# Altium footprint library Terminal_Blocks_Pluggable PCB_5.08mm.PcbLib: 299 footprints (part 6 of 19)
Each footprint in its own frame and in the unit in brackets; x right, y up, seen from the top. Pads: shape width x height; smd on the part's side, far side on the other; paste and mask are expansions set on the pad; w line width, h text height; cw(c..) or ccw(c..) is an arc to the next point about the centre after c.
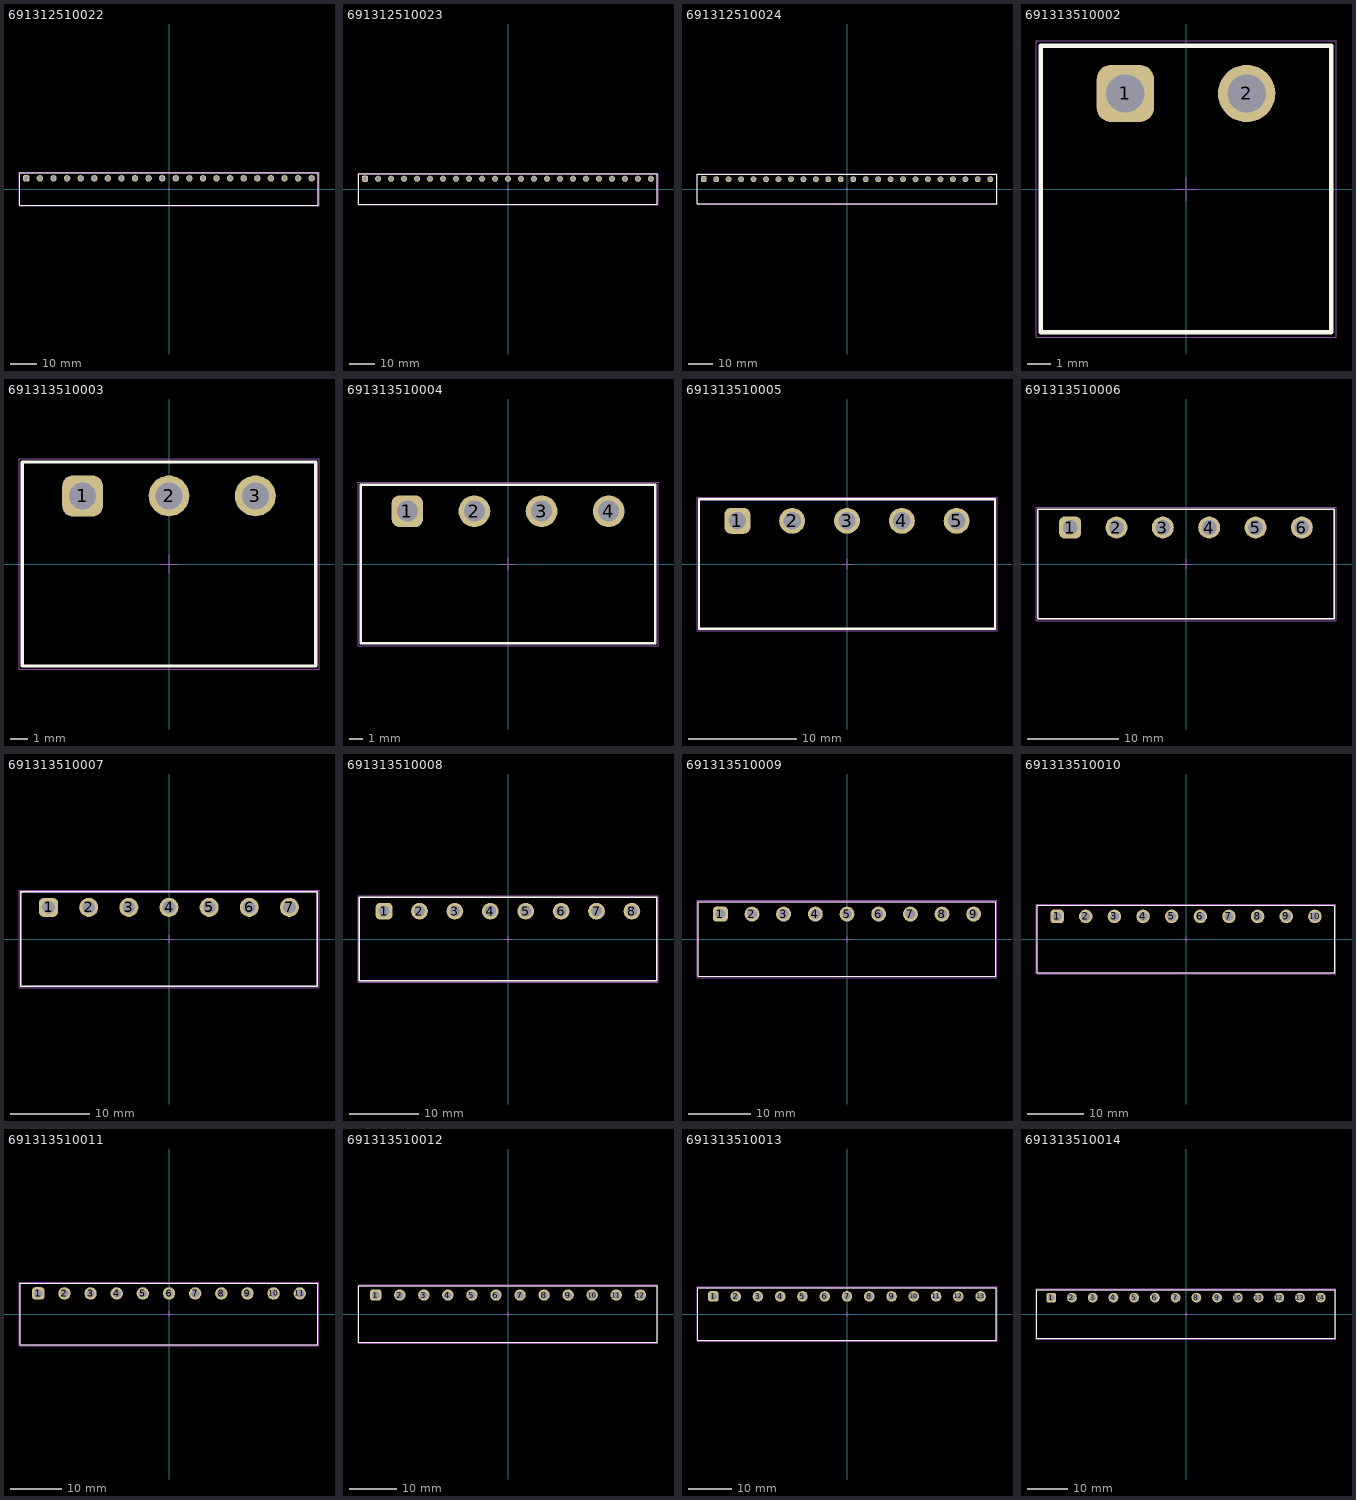
[diagram p5: the footprints below, top view; thin cyan lines are the x and y axes]

## 691312510022 [mm] "5,08mm - PCB Headers - Horizontal - Opened ends - 22p"
height 8.5
pads (22):
  rrect50% 2.4x2.4 hole 1.6: 1(-53.34,4)
  round 2.4 hole 1.6: 2(-48.26,4) 3(-43.18,4) 4(-38.1,4) 5(-33.02,4) 6(-27.94,4) 7(-22.86,4) 8(-17.78,4) 9(-12.7,4) 10(-7.62,4) 11(-2.54,4) 12(2.54,4) 13(7.62,4) 14(12.7,4) 15(17.78,4) 16(22.86,4) 17(27.94,4) 18(33.02,4) 19(38.1,4) 20(43.18,4) 21(48.26,4) 22(53.34,4)
Top Overlay:
  lines w0.2: -55.88,-6 -55.88,6 55.88,6 55.88,-6 -55.88,-6
Top Designator:
  text ".Designator" at -7.498,-0.5 h1.5
Top Component Outline:
  lines w0.1: -55.88,-6 55.88,-6 55.88,6 -55.88,6 -55.88,-6
Top 3D Body:
  lines w0.1: -55.88,-6 -55.88,6 55.88,6 55.88,-6 -55.88,-6
Top Courtyard:
  lines w0.05: -56.08,-6.2 -56.08,6.2 56.08,6.2 56.08,-6.2 -56.08,-6.2
Top Component Center:
  lines w0.05: -0.5,0 0.5,0 ; 0,-0.5 0,0.5
3D body "691312510022.stp": height 8.55, standoff -3.45, extent -55.88,-6 55.88,6

## 691312510023 [mm] "5,08mm - PCB Headers - Horizontal - Opened ends - 23p"
height 8.5
pads (23):
  rrect50% 2.4x2.4 hole 1.6: 1(-55.88,4)
  round 2.4 hole 1.6: 2(-50.8,4) 3(-45.72,4) 4(-40.64,4) 5(-35.56,4) 6(-30.48,4) 7(-25.4,4) 8(-20.32,4) 9(-15.24,4) 10(-10.16,4) 11(-5.08,4) 12(0,4) 13(5.08,4) 14(10.16,4) 15(15.24,4) 16(20.32,4) 17(25.4,4) 18(30.48,4) 19(35.56,4) 20(40.64,4) 21(45.72,4) 22(50.8,4) 23(55.88,4)
Top Overlay:
  lines w0.2: -58.42,-6 -58.42,6 58.42,6 58.42,-6 -58.42,-6
Top Designator:
  text ".Designator" at -7.498,-0.5 h1.5
Top Component Outline:
  lines w0.1: -58.42,-6 58.42,-6 58.42,6 -58.42,6 -58.42,-6
Top 3D Body:
  lines w0.1: -58.42,-6 -58.42,6 58.42,6 58.42,-6 -58.42,-6
Top Courtyard:
  lines w0.05: -58.62,-6.2 -58.62,6.2 58.62,6.2 58.62,-6.2 -58.62,-6.2
Top Component Center:
  lines w0.05: -0.5,0 0.5,0 ; 0,-0.5 0,0.5
3D body "691312510023.stp": height 8.55, standoff -3.45, extent -58.42,-6 58.42,6

## 691312510024 [mm] "5,08mm - PCB Headers - Horizontal - Opened ends - 24p"
height 8.5
pads (24):
  rrect50% 2.4x2.4 hole 1.6: 1(-58.42,4)
  round 2.4 hole 1.6: 2(-53.34,4) 3(-48.26,4) 4(-43.18,4) 5(-38.1,4) 6(-33.02,4) 7(-27.94,4) 8(-22.86,4) 9(-17.78,4) 10(-12.7,4) 11(-7.62,4) 12(-2.54,4) 13(2.54,4) 14(7.62,4) 15(12.7,4) 16(17.78,4) 17(22.86,4) 18(27.94,4) 19(33.02,4) 20(38.1,4) 21(43.18,4) 22(48.26,4) 23(53.34,4) 24(58.42,4)
Top Overlay:
  lines w0.2: -60.96,-6 -60.96,6 60.96,6 60.96,-6 -60.96,-6
Top Designator:
  text ".Designator" at -7.498,-0.5 h1.5
Top Component Outline:
  lines w0.1: -60.96,-6 60.96,-6 60.96,6 -60.96,6 -60.96,-6
Top 3D Body:
  lines w0.1: -60.96,-6 -60.96,6 60.96,6 60.96,-6 -60.96,-6
Top Courtyard:
  lines w0.05: -61.16,-6.2 -61.16,6.2 61.16,6.2 61.16,-6.2 -61.16,-6.2
Top Component Center:
  lines w0.05: -0.5,0 0.5,0 ; 0,-0.5 0,0.5
3D body "691312510024.stp": height 8.55, standoff -3.45, extent -60.96,-6 60.96,6

## 691313510002 [mm] "5,08mm - PCB Headers - Horizontal - Closed ends - 02p"
height 8.5
pads (2):
  rrect50% 2.4x2.4 hole 1.6: 1(-2.54,4)
  round 2.4 hole 1.6: 2(2.54,4)
Top Overlay:
  lines w0.2: -6.08,-6 6.08,-6 6.08,6 -6.08,6 -6.08,-6
Top Designator:
  text ".Designator" at -7.498,-0.5 h1.5
Top Component Outline:
  lines w0.1: -6.08,-6 -6.08,6 6.08,6 6.08,-6 -6.08,-6
Top 3D Body:
  lines w0.1: -6.08,-6 6.08,-6 6.08,6 -6.08,6 -6.08,-6
Top Courtyard:
  lines w0.05: -6.28,-6.2 6.28,-6.2 6.28,6.2 -6.28,6.2 -6.28,-6.2
Top Component Center:
  lines w0.05: -0.5,0 0.5,0 ; 0,-0.5 0,0.5
3D body "691313510002.stp": height 8.55, standoff -3.45, extent -6.08,-6 6.08,6

## 691313510003 [mm] "5,08mm - PCB Headers - Horizontal - Closed ends - 03p"
height 8.5
pads (3):
  rrect50% 2.4x2.4 hole 1.6: 1(-5.08,4)
  round 2.4 hole 1.6: 2(0,4) 3(5.08,4)
Top Overlay:
  lines w0.2: -8.62,-6 8.62,-6 8.62,6 -8.62,6 -8.62,-6
Top Designator:
  text ".Designator" at -7.498,-0.5 h1.5
Top Component Outline:
  lines w0.1: -8.62,-6 -8.62,6 8.62,6 8.62,-6 -8.62,-6
Top 3D Body:
  lines w0.1: -8.62,-6 8.62,-6 8.62,6 -8.62,6 -8.62,-6
Top Courtyard:
  lines w0.05: -8.82,-6.2 8.82,-6.2 8.82,6.2 -8.82,6.2 -8.82,-6.2
Top Component Center:
  lines w0.05: -0.5,0 0.5,0 ; 0,-0.5 0,0.5
3D body "691313510003.stp": height 8.55, standoff -3.45, extent -8.62,-6 8.62,6

## 691313510004 [mm] "5,08mm - PCB Headers - Horizontal - Closed ends - 04p"
height 8.5
pads (4):
  rrect50% 2.4x2.4 hole 1.6: 1(-7.62,4)
  round 2.4 hole 1.6: 2(-2.54,4) 3(2.54,4) 4(7.62,4)
Top Overlay:
  lines w0.2: -11.16,-6 11.16,-6 11.16,6 -11.16,6 -11.16,-6
Top Designator:
  text ".Designator" at -7.498,-0.5 h1.5
Top Component Outline:
  lines w0.1: -11.16,-6 -11.16,6 11.16,6 11.16,-6 -11.16,-6
Top 3D Body:
  lines w0.1: -11.16,-6 11.16,-6 11.16,6 -11.16,6 -11.16,-6
Top Courtyard:
  lines w0.05: -11.36,-6.2 11.36,-6.2 11.36,6.2 -11.36,6.2 -11.36,-6.2
Top Component Center:
  lines w0.05: -0.5,0 0.5,0 ; 0,-0.5 0,0.5
3D body "691313510004.stp": height 8.55, standoff -3.45, extent -11.16,-6 11.16,6

## 691313510005 [mm] "5,08mm - PCB Headers - Horizontal - Closed ends - 05p"
height 8.5
pads (5):
  rrect50% 2.4x2.4 hole 1.6: 1(-10.16,4)
  round 2.4 hole 1.6: 2(-5.08,4) 3(0,4) 4(5.08,4) 5(10.16,4)
Top Overlay:
  lines w0.2: -13.7,-6 13.7,-6 13.7,6 -13.7,6 -13.7,-6
Top Designator:
  text ".Designator" at -7.498,-0.5 h1.5
Top Component Outline:
  lines w0.1: -13.7,-6 -13.7,6 13.7,6 13.7,-6 -13.7,-6
Top 3D Body:
  lines w0.1: -13.7,-6 13.7,-6 13.7,6 -13.7,6 -13.7,-6
Top Courtyard:
  lines w0.05: -13.9,-6.2 13.9,-6.2 13.9,6.2 -13.9,6.2 -13.9,-6.2
Top Component Center:
  lines w0.05: -0.5,0 0.5,0 ; 0,-0.5 0,0.5
3D body "691313510005.stp": height 8.55, standoff -3.45, extent -13.7,-6 13.7,6

## 691313510006 [mm] "5,08mm - PCB Headers - Horizontal - Closed ends - 06p"
height 8.5
pads (6):
  rrect50% 2.4x2.4 hole 1.6: 1(-12.7,4)
  round 2.4 hole 1.6: 2(-7.62,4) 3(-2.54,4) 4(2.54,4) 5(7.62,4) 6(12.7,4)
Top Overlay:
  lines w0.2: -16.24,-6 16.24,-6 16.24,6 -16.24,6 -16.24,-6
Top Designator:
  text ".Designator" at -7.498,-0.5 h1.5
Top Component Outline:
  lines w0.1: -16.24,-6 -16.24,6 16.24,6 16.24,-6 -16.24,-6
Top 3D Body:
  lines w0.1: -16.24,-6 16.24,-6 16.24,6 -16.24,6 -16.24,-6
Top Courtyard:
  lines w0.05: -16.44,-6.2 16.44,-6.2 16.44,6.2 -16.44,6.2 -16.44,-6.2
Top Component Center:
  lines w0.05: -0.5,0 0.5,0 ; 0,-0.5 0,0.5
3D body "691313510006.stp": height 8.55, standoff -3.45, extent -16.24,-6 16.24,6

## 691313510007 [mm] "5,08mm - PCB Headers - Horizontal - Closed ends - 07p"
height 8.5
pads (7):
  rrect50% 2.4x2.4 hole 1.6: 1(-15.24,4)
  round 2.4 hole 1.6: 2(-10.16,4) 3(-5.08,4) 4(0,4) 5(5.08,4) 6(10.16,4) 7(15.24,4)
Top Overlay:
  lines w0.2: -18.78,-6 18.78,-6 18.78,6 -18.78,6 -18.78,-6
Top Designator:
  text ".Designator" at -7.498,-0.5 h1.5
Top Component Outline:
  lines w0.1: -18.78,-6 -18.78,6 18.78,6 18.78,-6 -18.78,-6
Top 3D Body:
  lines w0.1: -18.78,-6 18.78,-6 18.78,6 -18.78,6 -18.78,-6
Top Courtyard:
  lines w0.05: -18.98,-6.2 18.98,-6.2 18.98,6.2 -18.98,6.2 -18.98,-6.2
Top Component Center:
  lines w0.05: -0.5,0 0.5,0 ; 0,-0.5 0,0.5
3D body "691313510007.stp": height 8.55, standoff -3.45, extent -18.78,-6 18.78,6

## 691313510008 [mm] "5,08mm - PCB Headers - Horizontal - Closed ends - 08p"
height 8.5
pads (8):
  rrect50% 2.4x2.4 hole 1.6: 1(-17.78,4)
  round 2.4 hole 1.6: 2(-12.7,4) 3(-7.62,4) 4(-2.54,4) 5(2.54,4) 6(7.62,4) 7(12.7,4) 8(17.78,4)
Top Overlay:
  lines w0.2: -21.32,-6 -21.32,6 21.32,6 21.32,-6 -21.32,-6
Top Designator:
  text ".Designator" at -7.498,-0.5 h1.5
Top Component Outline:
  lines w0.1: -21.32,-6 21.32,-6 21.32,6 -21.32,6 -21.32,-6
Top 3D Body:
  lines w0.1: -21.32,-6 -21.32,6 21.32,6 21.32,-6 -21.32,-6
Top Courtyard:
  lines w0.05: -21.52,-6.2 -21.52,6.2 21.52,6.2 21.52,-6.2 -21.52,-6.2
Top Component Center:
  lines w0.05: -0.5,0 0.5,0 ; 0,-0.5 0,0.5
3D body "691313510008.stp": height 8.55, standoff -3.45, extent -21.32,-6 21.32,6

## 691313510009 [mm] "5,08mm - PCB Headers - Horizontal - Closed ends - 09p"
height 8.5
pads (9):
  rrect50% 2.4x2.4 hole 1.6: 1(-20.32,4)
  round 2.4 hole 1.6: 2(-15.24,4) 3(-10.16,4) 4(-5.08,4) 5(0,4) 6(5.08,4) 7(10.16,4) 8(15.24,4) 9(20.32,4)
Top Overlay:
  lines w0.2: -23.86,-6 23.86,-6 23.86,6 -23.86,6 -23.86,-6
Top Designator:
  text ".Designator" at -7.498,-0.5 h1.5
Top Component Outline:
  lines w0.1: -23.86,-6 -23.86,6 23.86,6 23.86,-6 -23.86,-6
Top 3D Body:
  lines w0.1: -23.86,-6 23.86,-6 23.86,6 -23.86,6 -23.86,-6
Top Courtyard:
  lines w0.05: -24.06,-6.2 24.06,-6.2 24.06,6.2 -24.06,6.2 -24.06,-6.2
Top Component Center:
  lines w0.05: -0.5,0 0.5,0 ; 0,-0.5 0,0.5
3D body "691313510009.stp": height 8.55, standoff -3.45, extent -23.86,-6 23.86,6

## 691313510010 [mm] "5,08mm - PCB Headers - Horizontal - Closed ends - 10p"
height 8.5
pads (10):
  rrect50% 2.4x2.4 hole 1.6: 1(-22.86,4)
  round 2.4 hole 1.6: 2(-17.78,4) 3(-12.7,4) 4(-7.62,4) 5(-2.54,4) 6(2.54,4) 7(7.62,4) 8(12.7,4) 9(17.78,4) 10(22.86,4)
Top Overlay:
  lines w0.2: -26.4,-6 -26.4,6 26.4,6 26.4,-6 -26.4,-6
Top Designator:
  text ".Designator" at -7.498,-0.5 h1.5
Top Component Outline:
  lines w0.1: -26.4,-6 26.4,-6 26.4,6 -26.4,6 -26.4,-6
Top 3D Body:
  lines w0.1: -26.4,-6 -26.4,6 26.4,6 26.4,-6 -26.4,-6
Top Courtyard:
  lines w0.05: -26.6,-6.2 -26.6,6.2 26.6,6.2 26.6,-6.2 -26.6,-6.2
Top Component Center:
  lines w0.05: -0.5,0 0.5,0 ; 0,-0.5 0,0.5
3D body "691313510010.stp": height 8.55, standoff -3.45, extent -26.4,-6 26.4,6

## 691313510011 [mm] "5,08mm - PCB Headers - Horizontal - Closed ends - 11p"
height 8.5
pads (11):
  rrect50% 2.4x2.4 hole 1.6: 1(-25.4,4)
  round 2.4 hole 1.6: 2(-20.32,4) 3(-15.24,4) 4(-10.16,4) 5(-5.08,4) 6(0,4) 7(5.08,4) 8(10.16,4) 9(15.24,4) 10(20.32,4) 11(25.4,4)
Top Overlay:
  lines w0.2: -28.94,-6 -28.94,6 28.94,6 28.94,-6 -28.94,-6
Top Designator:
  text ".Designator" at -7.498,-0.5 h1.5
Top Component Outline:
  lines w0.1: -28.94,-6 28.94,-6 28.94,6 -28.94,6 -28.94,-6
Top 3D Body:
  lines w0.1: -28.94,-6 -28.94,6 28.94,6 28.94,-6 -28.94,-6
Top Courtyard:
  lines w0.05: -29.14,-6.2 -29.14,6.2 29.14,6.2 29.14,-6.2 -29.14,-6.2
Top Component Center:
  lines w0.05: -0.5,0 0.5,0 ; 0,-0.5 0,0.5
3D body "691313510011.stp": height 8.55, standoff -3.45, extent -28.94,-6 28.94,6

## 691313510012 [mm] "5,08mm - PCB Headers - Horizontal - Closed ends - 12p"
height 8.5
pads (12):
  rrect50% 2.4x2.4 hole 1.6: 1(-27.94,4)
  round 2.4 hole 1.6: 2(-22.86,4) 3(-17.78,4) 4(-12.7,4) 5(-7.62,4) 6(-2.54,4) 7(2.54,4) 8(7.62,4) 9(12.7,4) 10(17.78,4) 11(22.86,4) 12(27.94,4)
Top Overlay:
  lines w0.2: -31.48,-6 31.48,-6 31.48,6 -31.48,6 -31.48,-6
Top Designator:
  text ".Designator" at -7.498,-0.5 h1.5
Top Component Outline:
  lines w0.1: -31.48,-6 -31.48,6 31.48,6 31.48,-6 -31.48,-6
Top 3D Body:
  lines w0.1: -31.48,-6 31.48,-6 31.48,6 -31.48,6 -31.48,-6
Top Courtyard:
  lines w0.05: -31.68,-6.2 31.68,-6.2 31.68,6.2 -31.68,6.2 -31.68,-6.2
Top Component Center:
  lines w0.05: -0.5,0 0.5,0 ; 0,-0.5 0,0.5
3D body "691313510012.stp": height 8.55, standoff -3.45, extent -31.48,-6 31.48,6

## 691313510013 [mm] "5,08mm - PCB Headers - Horizontal - Closed ends - 13p"
height 8.5
pads (13):
  rrect50% 2.4x2.4 hole 1.6: 1(-30.48,4)
  round 2.4 hole 1.6: 2(-25.4,4) 3(-20.32,4) 4(-15.24,4) 5(-10.16,4) 6(-5.08,4) 7(0,4) 8(5.08,4) 9(10.16,4) 10(15.24,4) 11(20.32,4) 12(25.4,4) 13(30.48,4)
Top Overlay:
  lines w0.2: -34.02,-6 -34.02,6 34.02,6 34.02,-6 -34.02,-6
Top Designator:
  text ".Designator" at -7.498,-0.5 h1.5
Top Component Outline:
  lines w0.1: -34.02,-6 34.02,-6 34.02,6 -34.02,6 -34.02,-6
Top 3D Body:
  lines w0.1: -34.02,-6 -34.02,6 34.02,6 34.02,-6 -34.02,-6
Top Courtyard:
  lines w0.05: -34.22,-6.2 -34.22,6.2 34.22,6.2 34.22,-6.2 -34.22,-6.2
Top Component Center:
  lines w0.05: -0.5,0 0.5,0 ; 0,-0.5 0,0.5
3D body "691313510013.stp": height 8.55, standoff -3.45, extent -34.02,-6 34.02,6

## 691313510014 [mm] "5,08mm - PCB Headers - Horizontal - Closed ends - 14p"
height 8.5
pads (14):
  rrect50% 2.4x2.4 hole 1.6: 1(-33.02,4)
  round 2.4 hole 1.6: 2(-27.94,4) 3(-22.86,4) 4(-17.78,4) 5(-12.7,4) 6(-7.62,4) 7(-2.54,4) 8(2.54,4) 9(7.62,4) 10(12.7,4) 11(17.78,4) 12(22.86,4) 13(27.94,4) 14(33.02,4)
Top Overlay:
  lines w0.2: -36.56,-6 36.56,-6 36.56,6 -36.56,6 -36.56,-6
Top Designator:
  text ".Designator" at -7.498,-0.5 h1.5
Top Component Outline:
  lines w0.1: -36.56,-6 -36.56,6 36.56,6 36.56,-6 -36.56,-6
Top 3D Body:
  lines w0.1: -36.56,-6 36.56,-6 36.56,6 -36.56,6 -36.56,-6
Top Courtyard:
  lines w0.05: -36.76,-6.2 36.76,-6.2 36.76,6.2 -36.76,6.2 -36.76,-6.2
Top Component Center:
  lines w0.05: -0.5,0 0.5,0 ; 0,-0.5 0,0.5
3D body "691313510014.stp": height 8.55, standoff -3.45, extent -36.56,-6 36.56,6